# Altium integrated library WSL25122L000FEA.IntLib: 1 symbol
Pins are listed as number, name and electrical type; pins without a type are passive.

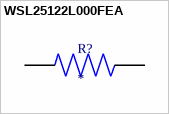
[diagram p0: symbol WSL25122L000FEA]

## WSL25122L000FEA
designator R?
MF: {'manufacturer': u'Vishay Dale'}; MP: WSL25122L000FEA; Package: None; Price: None; Value: *; Availability: Unavailable
footprint RES_WSL25122L000FEA
pins: 1, 2